# Altium footprint library PCB1.PcbLib: 21 footprints (part 2 of 2)
Each footprint in its own frame and in the unit in brackets; x right, y up, seen from the top. Pads: shape width x height; smd on the part's side, far side on the other; paste and mask are expansions set on the pad; w line width, h text height; cw(c..) or ccw(c..) is an arc to the next point about the centre after c.
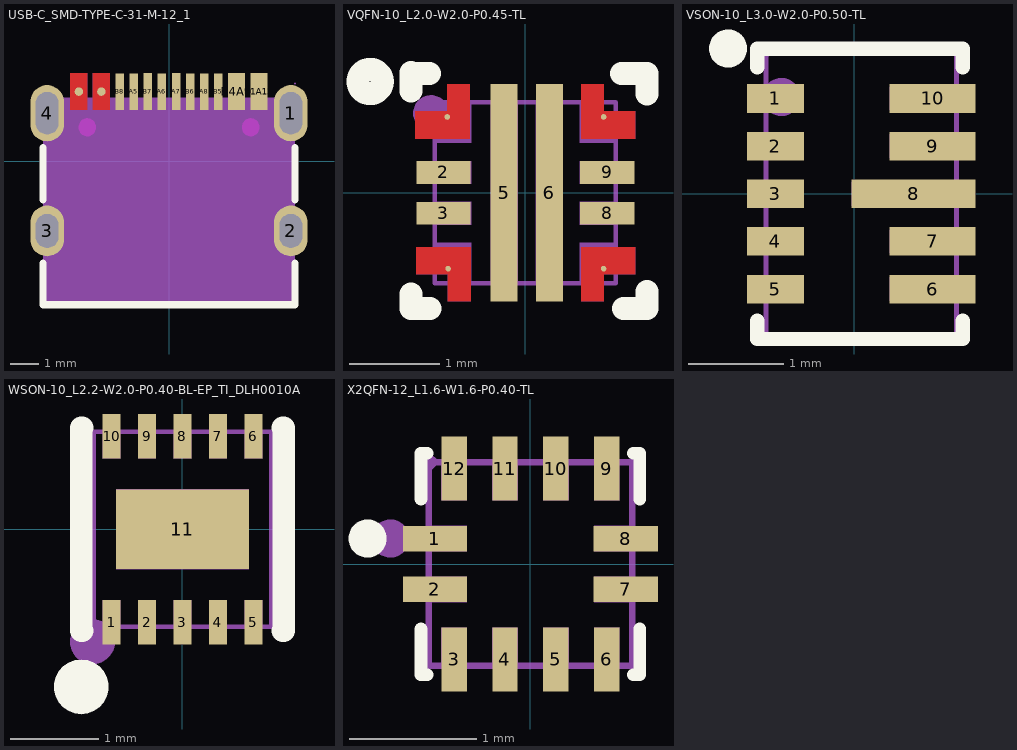
[diagram p1: the footprints below, top view; thin cyan lines are the x and y axes]

## USB-C_SMD-TYPE-C-31-M-12_1 [mm]
pads (16):
  oval 1.2x2 hole 0.8 slot 1.5 at 90 deg paste-2539.97 mask+0.051: 1(4.325,1.706) 4(-4.325,1.706)
  oval 1.2x1.8 hole 0.8 slot 1.2 at 90 deg copper offset 0,0 paste-2539.97 mask+0.051: 2(4.325,-2.474) 3(-4.325,-2.474)
  round 0.3 smd: A1B12(-3.2,2.474) A4B9(-2.4,2.474)
  rect 0.3x1.3 smd paste-100 mask+0.051: A5(-1.25,2.474) A6(-0.25,2.474) A7(0.25,2.474) A8(1.25,2.474) B5(1.75,2.474) B6(0.75,2.474) B7(-0.75,2.474) B8(-1.75,2.474)
  rect 0.6x1.3 smd paste-100 mask+0.051: B1A12(3.2,2.474) B4A9(2.4,2.474)
Top Layer:
  region: -2.1,1.824 -2.1,3.124 -2.4,3.124 -2.7,3.124 -2.7,1.824 -2.4,1.824
  region: -2.9,1.824 -2.9,3.124 -3.2,3.124 -3.5,3.124 -3.5,1.824 -3.2,1.824
Bottom Layer:
  region: -2.1,1.824 -2.1,3.124 -2.4,3.124 -2.7,3.124 -2.7,1.824 -2.4,1.824
  region: -2.9,1.824 -2.9,3.124 -3.2,3.124 -3.5,3.124 -3.5,1.824 -3.2,1.824
Top Overlay:
  lines w0.254: -4.469,-3.613 -4.469,-5.094 4.471,-5.094 4.471,-3.612 ; -4.469,-1.376 -4.469,0.487 ; 4.471,-1.376 4.471,0.488
Top Paste:
  drawing of 16 lines, arcs and shapes, not listed
Keep-Out Layer:
  board cut-out: 3.2,1.206 3.2,1.146 3.154,1.036 3.07,0.951 2.96,0.906 2.84,0.906 2.73,0.951 2.646,1.036 2.6,1.146 2.6,1.206 2.6,1.265 2.646,1.376 2.73,1.46 2.84,1.506 2.96,1.506 3.07,1.46 3.154,1.376 3.2,1.265 3.2,1.206
  board cut-out: -2.6,1.206 -2.6,1.146 -2.646,1.036 -2.73,0.951 -2.84,0.906 -2.96,0.906 -3.07,0.951 -3.154,1.036 -3.2,1.146 -3.2,1.206 -3.2,1.265 -3.154,1.376 -3.07,1.46 -2.96,1.506 -2.84,1.506 -2.73,1.46 -2.646,1.376 -2.6,1.265 -2.6,1.206
Keep-Out Layer:
  circle w0.003: c2.9,1.206 r0.3
  circle w0.003: c-2.9,1.206 r0.3
  region: 3.2,1.206 3.191,1.134 3.166,1.066 3.124,1.007 3.07,0.959 3.006,0.925 2.936,0.908 2.864,0.908 2.794,0.925 2.729,0.959 2.675,1.007 2.634,1.066 2.609,1.134 2.6,1.206 2.609,1.277 2.634,1.345 2.675,1.405 2.729,1.453 2.794,1.486 2.864,1.503 2.936,1.503 3.006,1.486 3.07,1.453 3.124,1.405 3.166,1.345 3.191,1.277
  region: 3.2,1.206 3.2,1.146 3.154,1.036 3.07,0.951 2.96,0.906 2.84,0.906 2.73,0.951 2.646,1.036 2.6,1.146 2.6,1.206 2.6,1.265 2.646,1.376 2.73,1.46 2.84,1.506 2.96,1.506 3.07,1.46 3.154,1.376 3.2,1.265 3.2,1.206
  region: -2.6,1.206 -2.609,1.134 -2.634,1.066 -2.675,1.007 -2.729,0.959 -2.794,0.925 -2.864,0.908 -2.936,0.908 -3.006,0.925 -3.07,0.959 -3.124,1.007 -3.166,1.066 -3.191,1.134 -3.2,1.206 -3.191,1.277 -3.166,1.345 -3.124,1.405 -3.07,1.453 -3.006,1.486 -2.936,1.503 -2.864,1.503 -2.794,1.486 -2.729,1.453 -2.675,1.405 -2.634,1.345 -2.609,1.277
  region: -2.6,1.206 -2.6,1.146 -2.646,1.036 -2.73,0.951 -2.84,0.906 -2.96,0.906 -3.07,0.951 -3.154,1.036 -3.2,1.146 -3.2,1.206 -3.2,1.265 -3.154,1.376 -3.07,1.46 -2.96,1.506 -2.84,1.506 -2.73,1.46 -2.646,1.376 -2.6,1.265 -2.6,1.206
Mechanical 1:
  circle w0.003: c2.9,1.206 r0.3
  circle w0.003: c-2.9,1.206 r0.3
Mechanical 6:
  circle w0.25: c-2.9,1.206 r0.125
  circle w0.25: c2.9,1.206 r0.125
Mechanical 7:
  region: -4.47,-5.094 -4.47,2.256 4.47,2.256 4.47,-5.094
Mechanical 8:
  region: 4.505,2.756 4.505,2.744 4.487,2.726 4.463,2.726 4.445,2.744 4.445,2.756 4.445,2.768 4.463,2.786 4.487,2.786 4.505,2.768 4.505,2.756
Mechanical 9:
  region: 3,2.756 3.4,2.756 3.4,2.056 3,2.056
  region: 2.2,2.756 2.6,2.756 2.6,2.056 2.2,2.056
  region: -2.6,2.756 -2.2,2.756 -2.2,2.056 -2.6,2.056
  region: -3.4,2.756 -3,2.756 -3,2.056 -3.4,2.056
  region: -1.85,2.756 -1.65,2.756 -1.65,2.056 -1.85,2.056
  region: -1.35,2.756 -1.15,2.756 -1.15,2.056 -1.35,2.056
  region: -0.85,2.756 -0.65,2.756 -0.65,2.056 -0.85,2.056
  region: -0.35,2.756 -0.15,2.756 -0.15,2.056 -0.35,2.056
  region: 0.15,2.756 0.35,2.756 0.35,2.056 0.15,2.056
  region: 0.65,2.756 0.85,2.756 0.85,2.056 0.65,2.056
  region: 1.15,2.756 1.35,2.756 1.35,2.056 1.15,2.056
  region: 1.65,2.756 1.85,2.756 1.85,2.056 1.65,2.056
  region: -4.475,2.256 -4.175,2.256 -4.175,1.156 -4.475,1.156
  region: 4.175,2.256 4.475,2.256 4.475,1.156 4.175,1.156
  region: 4.175,-2.074 4.475,-2.074 4.475,-2.874 4.175,-2.874
  region: -4.475,-2.074 -4.175,-2.074 -4.175,-2.874 -4.475,-2.874
Multi-Layer:
  region: -2.1,1.824 -2.1,3.124 -2.4,3.124 -2.7,3.124 -2.7,1.824 -2.4,1.824
  region: -2.9,1.824 -2.9,3.124 -3.2,3.124 -3.5,3.124 -3.5,1.824 -3.2,1.824

## VQFN-10_L2.0-W2.0-P0.45-TL [mm]
pads (10):
  round 0.062 smd: 1(-0.864,0.838) 4(-0.854,-0.838) 7(0.864,-0.838) 10(0.864,0.838)
  rect 0.6x0.25 smd paste+0 mask+0.05: 2(-0.905,0.225) 3(-0.905,-0.225) 8(0.905,-0.225) 9(0.905,0.225)
  rect 0.3x2.4 smd paste+0 mask+0.05: 5(-0.235,0) 6(0.265,0)
Top Layer:
  region: 0.865,1.2 0.865,0.9 1.215,0.9 1.215,0.6 0.865,0.6 0.615,0.6 0.615,0.9 0.615,1.2
  region: 0.865,-1.2 0.865,-0.9 1.215,-0.9 1.215,-0.6 0.865,-0.6 0.615,-0.6 0.615,-0.9 0.615,-1.2
  region: -0.855,-1.2 -0.855,-0.9 -1.205,-0.9 -1.205,-0.6 -0.855,-0.6 -0.605,-0.6 -0.605,-0.9 -0.605,-1.2
  region: -0.865,1.2 -0.865,0.9 -1.215,0.9 -1.215,0.6 -0.865,0.6 -0.615,0.6 -0.615,0.9 -0.615,1.2
Bottom Layer:
  region: 0.865,1.2 0.865,0.9 1.215,0.9 1.215,0.6 0.865,0.6 0.615,0.6 0.615,0.9 0.615,1.2
  region: 0.865,-1.2 0.865,-0.9 1.215,-0.9 1.215,-0.6 0.865,-0.6 0.615,-0.6 0.615,-0.9 0.615,-1.2
  region: -0.855,-1.2 -0.855,-0.9 -1.205,-0.9 -1.205,-0.6 -0.855,-0.6 -0.605,-0.6 -0.605,-0.9 -0.605,-1.2
  region: -0.865,1.2 -0.865,0.9 -1.215,0.9 -1.215,0.6 -0.865,0.6 -0.615,0.6 -0.615,0.9 -0.615,1.2
Top Overlay:
  circle w0.254: c-1.715,1.23 r0.135
  lines w0.254: -1.265,-1.117 -1.265,-1.28 -1.052,-1.28 ; -1.265,1.126 -1.265,1.33 ; -1.225,1.32 -1.062,1.32 ; 1.062,1.32 1.345,1.32 1.345,1.091 ; 1.082,-1.28 1.345,-1.28 1.345,-1.091
Mechanical 6:
  circle w0.2: c-1.042,0.878 r0.1
Mechanical 7:
  lines w0.051: -1,-1 1,-1 1,1 -1,1 -1,-1
Mechanical 8:
  region: -0.94,1 -0.94,0.975 -0.975,0.94 -1.025,0.94 -1.06,0.975 -1.06,1 -1.06,1.025 -1.025,1.06 -0.975,1.06 -0.94,1.025 -0.94,1
Mechanical 9:
  region: 0.115,1 0.415,1 0.415,-1 0.115,-1
  region: -0.385,1 -0.085,1 -0.085,-1 -0.385,-1
  region: 0.6,-1 0.6,-0.85 0.6,-0.553 1,-0.553 1,-0.853 0.85,-0.853 0.85,-1
  region: -0.6,-1 -0.6,-0.85 -0.6,-0.553 -1,-0.553 -1,-0.853 -0.85,-0.853 -0.85,-1
  region: 0.6,1 0.6,0.85 0.6,0.553 1,0.553 1,0.853 0.85,0.853 0.85,1
  region: -0.6,1 -0.6,0.85 -0.6,0.553 -1,0.553 -1,0.853 -0.85,0.853 -0.85,1
  region: 0.6,0.1 0.6,0.35 1,0.35 1,0.1
  region: 0.6,-0.35 0.6,-0.1 1,-0.1 1,-0.35
  region: -1,-0.35 -1,-0.1 -0.6,-0.1 -0.6,-0.35
  region: -1,0.1 -1,0.35 -0.6,0.35 -0.6,0.1
Multi-Layer:
  region: 0.865,1.2 0.865,0.9 1.215,0.9 1.215,0.6 0.865,0.6 0.615,0.6 0.615,0.9 0.615,1.2
  region: 0.865,-1.2 0.865,-0.9 1.215,-0.9 1.215,-0.6 0.865,-0.6 0.615,-0.6 0.615,-0.9 0.615,-1.2
  region: -0.855,-1.2 -0.855,-0.9 -1.205,-0.9 -1.205,-0.6 -0.855,-0.6 -0.605,-0.6 -0.605,-0.9 -0.605,-1.2
  region: -0.865,1.2 -0.865,0.9 -1.215,0.9 -1.215,0.6 -0.865,0.6 -0.615,0.6 -0.615,0.9 -0.615,1.2

## VSON-10_L3.0-W2.0-P0.50-TL [mm]
pads (10):
  rect 0.6x0.3 smd: 1(-0.825,1) 2(-0.825,0.5) 3(-0.825,0) 4(-0.825,-0.5) 5(-0.825,-1)
  rect 0.9x0.3 smd: 6(0.825,-1) 7(0.825,-0.5) 9(0.825,0.5) 10(0.825,1)
  rect 1.3x0.3 smd: 8(0.625,0)
Top Overlay:
  circle w0.2: c-1.322,1.524 r0.1
  lines w0.152: -1.016,-1.33 -1.016,-1.524 1.143,-1.524 1.143,-1.33 ; -1.016,1.33 -1.016,1.524 1.143,1.524 1.143,1.33
Mechanical 6:
  circle w0.2: c-0.762,1.016 r0.1
Mechanical 7:
  lines w0.051: -0.925,-1.5 1.075,-1.5 1.075,1.5 -0.925,1.5 -0.925,-1.5
Mechanical 8:
  region: -0.865,1.5 -0.865,1.475 -0.9,1.44 -0.95,1.44 -0.985,1.475 -0.985,1.5 -0.985,1.525 -0.95,1.56 -0.9,1.56 -0.865,1.525 -0.865,1.5
Mechanical 9:
  region: -0.025,-0.125 -0.025,0.125 1.075,0.125 1.075,-0.125
  region: -0.925,-1.125 -0.925,-0.875 -0.525,-0.875 -0.525,-1.125
  region: -0.925,-0.625 -0.925,-0.375 -0.525,-0.375 -0.525,-0.625
  region: -0.925,-0.125 -0.925,0.125 -0.525,0.125 -0.525,-0.125
  region: -0.925,0.375 -0.925,0.625 -0.525,0.625 -0.525,0.375
  region: -0.925,0.875 -0.925,1.125 -0.525,1.125 -0.525,0.875
  region: 0.375,0.875 0.375,1.125 1.075,1.125 1.075,0.875
  region: 0.375,0.375 0.375,0.625 1.075,0.625 1.075,0.375
  region: 0.375,-0.625 0.375,-0.375 1.075,-0.375 1.075,-0.625
  region: 0.375,-1.125 0.375,-0.875 1.075,-0.875 1.075,-1.125

## WSON-10_L2.2-W2.0-P0.40-BL-EP_TI_DLH0010A [mm]
pads (11):
  rect 0.2x0.5 smd: 1(-0.8,-1.05) 2(-0.4,-1.05) 3(0,-1.05) 4(0.4,-1.05) 5(0.8,-1.05) 6(0.8,1.05) 7(0.4,1.05) 8(0,1.05) 9(-0.4,1.05) 10(-0.8,1.05)
  rect 1.5x0.9 smd: 11(0,0)
Top Overlay:
  region: -1.143,-2.085 -1.216,-2.076 -1.286,-2.049 -1.346,-2.007 -1.395,-1.952 -1.43,-1.887 -1.447,-1.815 -1.447,-1.741 -1.43,-1.669 -1.395,-1.604 -1.346,-1.548 -1.286,-1.506 -1.216,-1.48 -1.143,-1.471 -1.07,-1.48 -1.001,-1.506 -0.94,-1.548 -0.891,-1.604 -0.856,-1.669 -0.839,-1.741 -0.839,-1.815 -0.856,-1.887 -0.891,-1.952 -0.94,-2.007 -1.001,-2.049 -1.07,-2.076 -1.143,-2.085
  lines w0.254: -1.131,-1.143 -1.143,-1.143 -1.143,0 -1.143,1.143 -1.131,1.143 ; 1.131,-1.143 1.143,-1.143 1.143,1.143 1.131,1.143
Mechanical 6:
  circle w0.254: c-1.016,-1.27 r0.127
Mechanical 7:
  lines w0.051: -1,-1.1 1,-1.1 1,1.1 -1,1.1 -1,-1.1
Mechanical 8:
  region: -0.94,-1.1 -0.94,-1.125 -0.975,-1.16 -1.025,-1.16 -1.06,-1.125 -1.06,-1.1 -1.06,-1.075 -1.025,-1.04 -0.975,-1.04 -0.94,-1.075 -0.94,-1.1
Mechanical 9:
  region: -0.75,-0.45 -0.75,0.45 0.75,0.45 0.75,-0.45
  region: -0.7,-0.8 -0.7,-1.1 -0.9,-1.1 -0.9,-0.8
  region: -0.3,-0.8 -0.3,-1.1 -0.5,-1.1 -0.5,-0.8
  region: 0.1,-0.8 0.1,-1.1 -0.1,-1.1 -0.1,-0.8
  region: 0.5,-0.8 0.5,-1.1 0.3,-1.1 0.3,-0.8
  region: 0.9,-0.8 0.9,-1.1 0.7,-1.1 0.7,-0.8
  region: 0.9,1.1 0.9,0.8 0.7,0.8 0.7,1.1
  region: 0.5,1.1 0.5,0.8 0.3,0.8 0.3,1.1
  region: 0.1,1.1 0.1,0.8 -0.1,0.8 -0.1,1.1
  region: -0.3,1.1 -0.3,0.8 -0.5,0.8 -0.5,1.1
  region: -0.7,1.1 -0.7,0.8 -0.9,0.8 -0.9,1.1

## X2QFN-12_L1.6-W1.6-P0.40-TL [mm]
pads (12):
  rect 0.505x0.2 smd: 1(-0.75,0.2) 2(-0.75,-0.2) 7(0.75,-0.2) 8(0.75,0.2)
  rect 0.2x0.505 smd: 3(-0.6,-0.75) 4(-0.2,-0.75) 5(0.2,-0.75) 6(0.6,-0.75) 9(0.6,0.75) 10(0.2,0.75) 11(-0.2,0.75) 12(-0.6,0.75)
Top Overlay:
  circle w0.15: c-1.28,0.2 r0.075
  lines w0.1: -0.86,-0.51 -0.86,-0.87 -0.81,-0.87 ; -0.86,0.51 -0.86,0.87 -0.81,0.87 ; 0.81,-0.87 0.86,-0.87 0.86,-0.51 ; 0.81,0.87 0.86,0.87 0.86,0.51
Mechanical 6:
  circle w0.15: c-1.1,0.2 r0.075
Mechanical 7:
  lines w0.051: -0.8,-0.8 -0.8,0.8 0.8,0.8 0.8,-0.8 -0.8,-0.8
Mechanical 8:
  region: -0.74,0.8 -0.74,0.775 -0.775,0.74 -0.825,0.74 -0.86,0.775 -0.86,0.8 -0.86,0.825 -0.825,0.86 -0.775,0.86 -0.74,0.825 -0.74,0.8
Mechanical 9:
  region: -0.8,0.3 -0.5,0.3 -0.5,0.1 -0.8,0.1
  region: -0.8,-0.1 -0.5,-0.1 -0.5,-0.3 -0.8,-0.3
  region: -0.7,-0.5 -0.5,-0.5 -0.5,-0.8 -0.7,-0.8
  region: -0.3,-0.5 -0.1,-0.5 -0.1,-0.8 -0.3,-0.8
  region: 0.1,-0.5 0.3,-0.5 0.3,-0.8 0.1,-0.8
  region: 0.5,-0.5 0.7,-0.5 0.7,-0.8 0.5,-0.8
  region: 0.8,-0.1 0.5,-0.1 0.5,-0.3 0.8,-0.3
  region: 0.8,0.3 0.5,0.3 0.5,0.1 0.8,0.1
  region: 0.5,0.5 0.7,0.5 0.7,0.8 0.5,0.8
  region: 0.1,0.5 0.3,0.5 0.3,0.8 0.1,0.8
  region: -0.3,0.5 -0.1,0.5 -0.1,0.8 -0.3,0.8
  region: -0.7,0.5 -0.5,0.5 -0.5,0.8 -0.7,0.8